# Altium footprint library Switches.PcbLib: 69 footprints (part 1 of 5)
Each footprint in its own frame and in the unit in brackets; x right, y up, seen from the top. Pads: shape width x height; smd on the part's side, far side on the other; paste and mask are expansions set on the pad; w line width, h text height; cw(c..) or ccw(c..) is an arc to the next point about the centre after c.
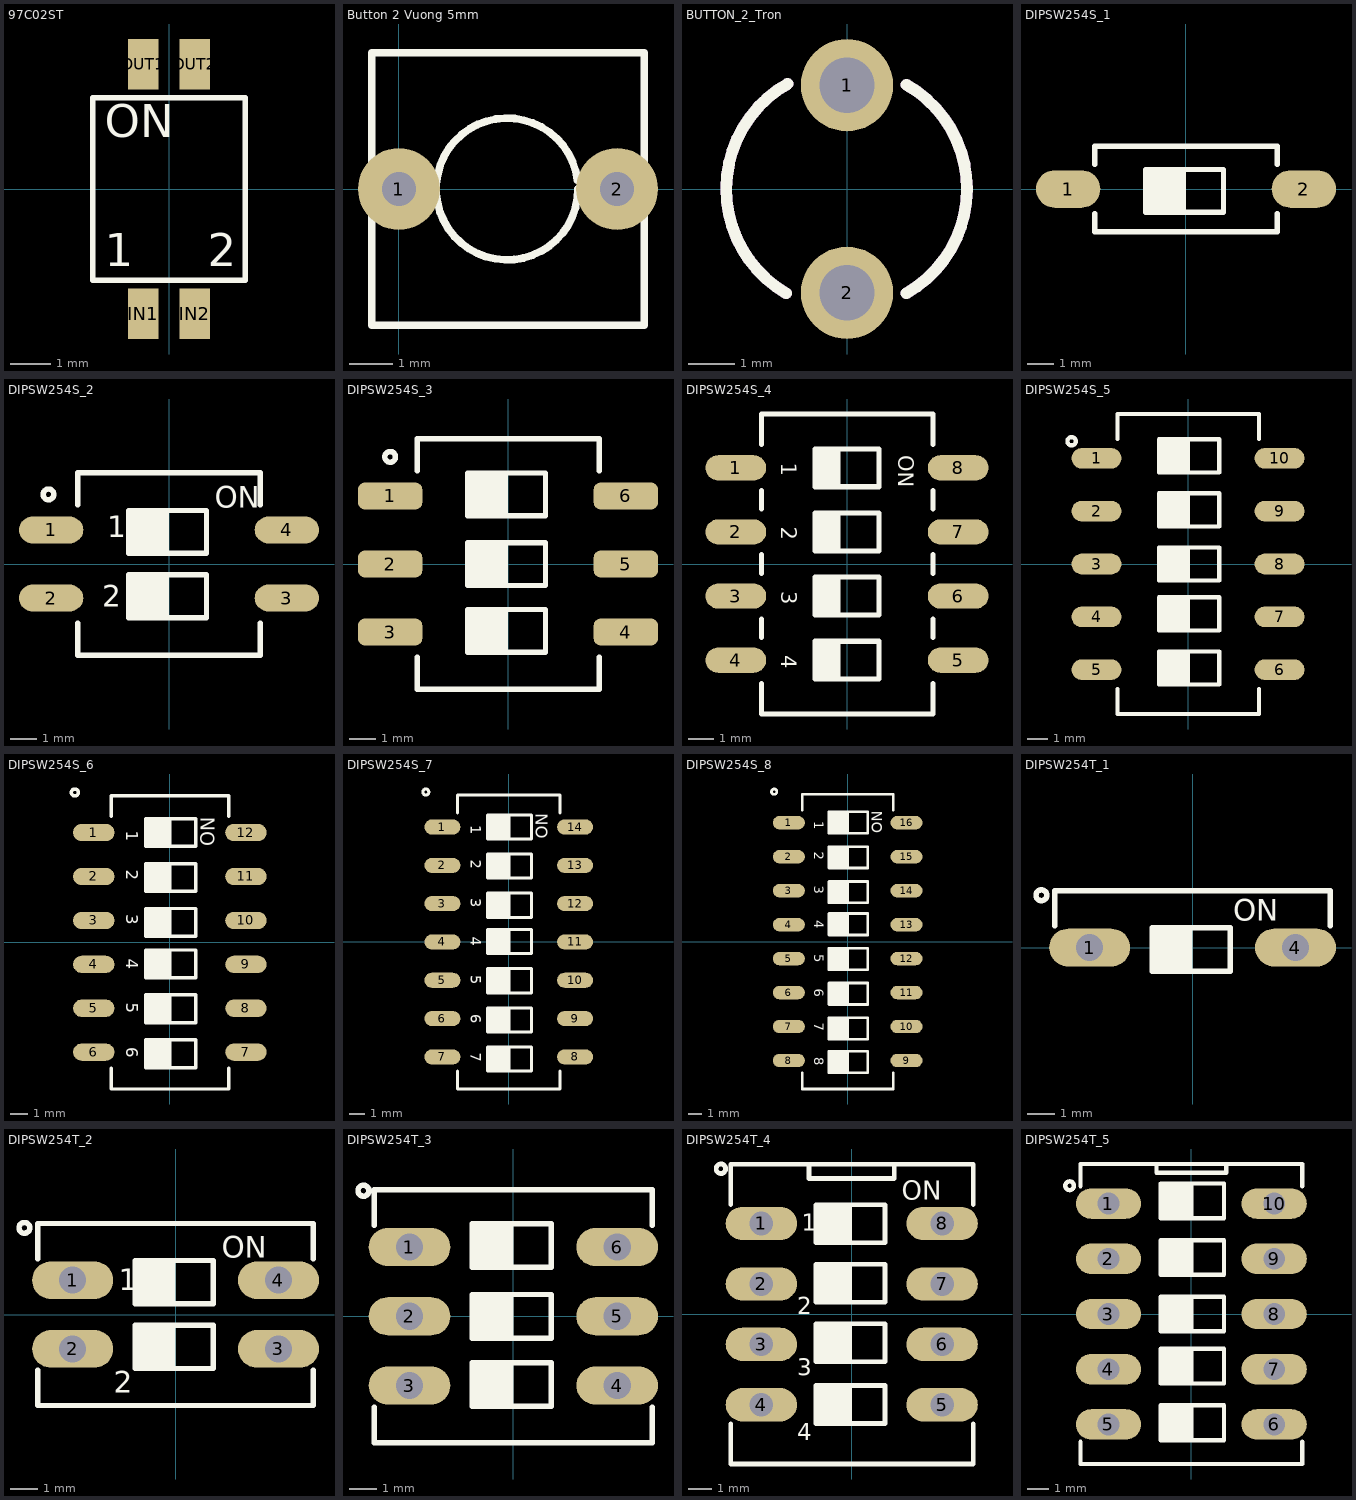
[diagram p0: the footprints below, top view; thin cyan lines are the x and y axes]

## 97C02ST [mm]
pads (4):
  rect 0.76x1.245 smd: IN1(-0.635,-3.075) IN2(0.635,-3.075) OUT1(-0.635,3.075) OUT2(0.635,3.075)
Top Overlay:
  lines w0.127: -1.88,-2.25 1.88,-2.25 1.88,2.25 -1.88,2.25 -1.88,-2.25
  text "2" at 0.953,-1.905 h0.81
  text "1" at -1.587,-1.905 h0.81
  text "ON" at -1.587,1.27 h0.81

## Button 2 Vuong 5mm [mil] "SW button 2pin, 250x 250 mil"
height 100
pads (2):
  round 75 hole 31: 1(0,0) 2(200,0)
Top Overlay:
  lines w7: 163.64,8.26 ccw(c99.17,0) 164.17,0 ; -25,-125 -25,125 225,125 225,-125 -25,-125
Top Designator:
  text ".Designator" at -46.08,-13.54 h60
3D body "boton.step": height 188.98, standoff -137.8, extent -23.62,-122.04 220.48,122.05

## BUTTON_2_Tron [mm]
pads (2):
  round 2 hole 1.2 mask+0: 1(0,2.25) 2(0,-2.25)
Top Overlay:
  lines w0.254: -1.315,-2.262 cw(c0,0) -1.287,2.278 ; 1.285,-2.261 ccw(c0,0) 1.29,2.258
Top Designator:
  text ".Designator" at -3.718,-0.344 h1.52
Mechanical 15:
  lines w0.254: -1.315,-2.262 cw(c0,0) -1.287,2.278 ; 1.285,-2.261 ccw(c0,0) 1.29,2.258
3D body: height 1.5, standoff 0, extent -2.485,-2.54 2.515,2.46
3D body: height 2.5, standoff 1.5, extent -1.475,-1.54 1.525,1.46

## DIPSW254S_1 [mm] "SWITCH DIP 1POS, THD, 2.54mm"
height 6.5
pads (2):
  oval 2.4x1.4 smd: 1(-4.4,0) 2(4.4,0)
Top Overlay:
  rectangle: -1.5,-0.87 0,0.73
  lines w0.2: -3.4,-0.93 -3.4,-1.6 3.4,-1.6 3.4,-0.93 ; -3.4,0.93 -3.4,1.6 3.4,1.6 3.4,0.93 ; -1.5,-0.87 -1.5,0.73 1.4,0.73 1.4,-0.87 -1.5,-0.87
Top Designator:
  text ".Designator" at -3.71,-0.344 h1.52
3D body "418121160801.stp": height 3.35, standoff 0.05, extent -4.95,-1.49 4.95,1.49

## DIPSW254S_2 [mm] "SWITCH DIP 2POS, THD, 2.54mm, SD02"
height 6.5
pads (4):
  oval 2.4x1 smd: 1(-4.4,1.27) 2(-4.4,-1.27) 3(4.4,-1.27) 4(4.4,1.27)
Top Overlay:
  circle w0.2: c-4.5,2.6 r0.2
  rectangle: -1.5,0.4 0,2
  rectangle: -1.5,-2 0,-0.4
  lines w0.2: -3.4,-2.2 -3.4,-3.4 3.4,-3.4 3.4,-2.2 ; -3.4,2.2 -3.4,3.4 3.4,3.4 3.4,2.2 ; -1.5,-2 1.4,-2 1.4,-0.4 -1.5,-0.4 -1.5,-2 ; -1.5,0.4 1.4,0.4 1.4,2 -1.5,2 -1.5,0.4
  text "2" at -2.5,-1.6 h0.8
  text "1" at -2.3,1 h0.8
  text "ON" at 1.7,2.1 h0.8
Top Designator:
  text ".Designator" at -3.71,-0.344 h1.52
3D body "User Library-DIP SW 2P.step": height 4.15, standoff 0, extent -4.95,-3.275 4.95,3.275

## DIPSW254S_3 [mm] "SWITCH DIP 3POS, THD, 2.54mm, SD03"
pads (6):
  rrect50% 2.4x1 smd: 1(-4.4,2.54) 2(-4.4,0) 3(-4.4,-2.54) 4(4.4,-2.54) 5(4.4,0) 6(4.4,2.54)
Top Overlay:
  circle w0.2: c-4.4,4 r0.2
  rectangle: -1.5,1.8 0,3.4
  rectangle: -1.5,-0.8 0,0.8
  rectangle: -1.5,-3.3 0,-1.7
  lines w0.2: -3.39,-3.47 -3.39,-4.67 3.41,-4.67 3.41,-3.47 ; -3.39,3.47 -3.39,4.67 3.41,4.67 3.41,3.47 ; -1.5,-3.3 1.4,-3.3 1.4,-1.7 -1.5,-1.7 -1.5,-3.3 ; -1.5,-0.8 1.4,-0.8 1.4,0.8 -1.5,0.8 -1.5,-0.8 ; -1.5,1.8 1.4,1.8 1.4,3.4 -1.5,3.4 -1.5,1.8
Top Designator:
  text ".Designator" at -3.71,-0.344 h1.52
3D body "User Library-DIP SW 3P.step": height 4.15, standoff 0, extent -4.95,-4.545 4.95,4.545

## DIPSW254S_4 [mm] "SWITCH DIP 4POS, SMD, 2.54mm, CTS-219-04"
pads (8):
  oval 2.4x1 smd: 1(-4.4,3.81) 2(-4.4,1.27) 3(-4.4,-1.27) 4(-4.4,-3.81) 5(4.4,-3.81) 6(4.4,-1.27) 7(4.4,1.27) 8(4.4,3.81)
Top Overlay:
  region: -1.27,4.56 -1.27,3.06 -0.254,3.06 -0.254,4.56
  region: -1.27,2.02 -1.27,0.52 -0.254,0.52 -0.254,2.02
  region: -1.27,-0.52 -1.27,-2.02 -0.254,-2.02 -0.254,-0.52
  region: -1.27,-3.06 -1.27,-4.56 -0.254,-4.56 -0.254,-3.06
  lines w0.2: -3.39,-4.74 -3.39,-5.94 3.41,-5.94 3.41,-4.74 ; -3.39,-2.91 -3.39,-2.17 ; -3.39,-0.37 -3.39,0.37 ; -3.39,2.17 -3.39,2.91 ; -3.39,4.74 -3.39,5.94 3.41,5.94 3.41,4.74 ; 3.41,-2.91 3.41,-2.17 ; 3.41,-0.37 3.41,0.37 ; 3.41,2.17 3.41,2.91 ; -1.27,-4.56 -1.27,-3.06 1.27,-3.06 1.27,-4.56 -1.27,-4.56 ; -1.27,-2.02 -1.27,-0.52 1.27,-0.52 1.27,-2.02 -1.27,-2.02 ; -1.27,0.52 -1.27,2.02 1.27,2.02 1.27,0.52 -1.27,0.52 ; -1.27,3.06 -1.27,4.56 1.27,4.56 1.27,3.06 -1.27,3.06
  text "ON" at 2.021,4.31 h0.61
  text "1" at -2.596,4.01 h0.61
  text "2" at -2.596,1.47 h0.61
  text "3" at -2.596,-1.07 h0.61
  text "4" at -2.596,-3.61 h0.61
Top Designator:
  text ".Designator" at -3.71,-0.344 h1.52
3D body "User Library-DIP SW 4P.step": height 4.15, standoff 0, extent -4.95,-5.815 4.95,5.815

## DIPSW254S_5 [mm] "SWITCH DIP 5POS, THD, 2.54mm,"
pads (10):
  oval 2.4x1 smd: 1(-4.4,5.08) 2(-4.4,2.54) 3(-4.4,0) 4(-4.4,-2.54) 5(-4.4,-5.08) 6(4.4,-5.08) 7(4.4,-2.54) 8(4.4,0) 9(4.4,2.54) 10(4.4,5.08)
Top Overlay:
  circle w0.2: c-5.6,5.9 r0.2
  rectangle: -1.4,4.4 0.1,6
  rectangle: -1.4,1.8 0.1,3.4
  rectangle: -1.4,-0.8 0.1,0.8
  rectangle: -1.4,-3.2 0.1,-1.6
  rectangle: -1.4,-5.8 0.1,-4.2
  lines w0.2: -3.39,-6.01 -3.39,-7.21 3.41,-7.21 3.41,-6.01 ; -3.39,6.01 -3.39,7.21 3.41,7.21 3.41,6.01 ; -1.4,-5.8 -1.4,-4.2 1.5,-4.2 1.5,-5.8 -1.4,-5.8 ; -1.4,-3.2 -1.4,-1.6 1.5,-1.6 1.5,-3.2 -1.4,-3.2 ; -1.4,-0.8 -1.4,0.8 1.5,0.8 1.5,-0.8 -1.4,-0.8 ; -1.4,1.8 -1.4,3.4 1.5,3.4 1.5,1.8 -1.4,1.8 ; -1.4,4.4 -1.4,6 1.5,6 1.5,4.4 -1.4,4.4
Top Designator:
  text ".Designator" at -3.81,-0.344 h1.52
3D body "User Library-DIP SW 5P.step": height 4.15, standoff 0, extent -4.95,-7.085 4.95,7.085

## DIPSW254S_6 [mm] "SWITCH DIP 6POS, THD, 2.54mm,"
height 6.5
pads (12):
  oval 2.4x1 smd: 1(-4.4,6.35) 2(-4.4,3.81) 3(-4.4,1.27) 4(-4.4,-1.27) 5(-4.4,-3.81) 6(-4.4,-6.35) 7(4.4,-6.35) 8(4.4,-3.81) 9(4.4,-1.27) 10(4.4,1.27) 11(4.4,3.81) 12(4.4,6.35)
Top Overlay:
  circle w0.2: c-5.5,8.67 r0.2
  rectangle: -1.4,-7.24 0.1,-5.64
  rectangle: -1.4,-4.64 0.1,-3.04
  rectangle: -1.4,-2.04 0.1,-0.44
  rectangle: -1.4,0.36 0.1,1.96
  rectangle: -1.4,2.96 0.1,4.56
  rectangle: -1.4,5.56 0.1,7.16
  lines w0.2: -3.39,-7.28 -3.39,-8.48 3.41,-8.48 3.41,-7.28 ; -3.39,7.28 -3.39,8.48 3.41,8.48 3.41,7.28 ; -1.4,-7.24 1.5,-7.24 1.5,-5.64 -1.4,-5.64 -1.4,-7.24 ; -1.4,-4.64 1.5,-4.64 1.5,-3.04 -1.4,-3.04 -1.4,-4.64 ; -1.4,-2.04 1.5,-2.04 1.5,-0.44 -1.4,-0.44 -1.4,-2.04 ; -1.4,0.36 1.5,0.36 1.5,1.96 -1.4,1.96 -1.4,0.36 ; -1.4,2.96 1.5,2.96 1.5,4.56 -1.4,4.56 -1.4,2.96 ; -1.4,5.56 1.5,5.56 1.5,7.16 -1.4,7.16 -1.4,5.56
  text "6" at -2.51,-6.055 h0.7
  text "5" at -2.51,-3.494 h0.7
  text "4" at -2.51,-0.934 h0.7
  text "3" at -2.51,1.627 h0.7
  text "2" at -2.51,4.187 h0.7
  text "1" at -2.51,6.451 h0.7
  text "ON" at 2.6,5.56 h0.8
Top Designator:
  text ".Designator" at -3.76,-0.149 h1.52
3D body "User Library-DIP SW 6P.step": height 4.15, standoff 0, extent -4.95,-8.355 4.95,8.355

## DIPSW254S_7 [mm] "SWITCH DIP 7POS, THD, 2.54mm,"
height 6.5
pads (14):
  oval 2.4x1 smd: 1(-4.4,7.62) 2(-4.4,5.08) 3(-4.4,2.54) 4(-4.4,0) 5(-4.4,-2.54) 6(-4.4,-5.08) 7(-4.4,-7.62) 8(4.4,-7.62) 9(4.4,-5.08) 10(4.4,-2.54) 11(4.4,0) 12(4.4,2.54) 13(4.4,5.08) 14(4.4,7.62)
Top Overlay:
  circle w0.2: c-5.5,9.94 r0.2
  rectangle: -1.4,6.83 0.1,8.43
  rectangle: -1.4,4.23 0.1,5.83
  rectangle: -1.4,1.63 0.1,3.23
  rectangle: -1.4,-0.77 0.1,0.83
  rectangle: -1.4,-3.37 0.1,-1.77
  rectangle: -1.4,-5.97 0.1,-4.37
  rectangle: -1.4,-8.57 0.1,-6.97
  lines w0.2: -3.39,-8.55 -3.39,-9.75 3.41,-9.75 3.41,-8.55 ; -3.39,8.55 -3.39,9.75 3.41,9.75 3.41,8.55 ; -1.4,-8.57 -1.4,-6.97 1.5,-6.97 1.5,-8.57 -1.4,-8.57 ; -1.4,-5.97 -1.4,-4.37 1.5,-4.37 1.5,-5.97 -1.4,-5.97 ; -1.4,-3.37 -1.4,-1.77 1.5,-1.77 1.5,-3.37 -1.4,-3.37 ; -1.4,-0.77 -1.4,0.83 1.5,0.83 1.5,-0.77 -1.4,-0.77 ; -1.4,1.63 -1.4,3.23 1.5,3.23 1.5,1.63 -1.4,1.63 ; -1.4,4.23 -1.4,5.83 1.5,5.83 1.5,4.23 -1.4,4.23 ; -1.4,6.83 -1.4,8.43 1.5,8.43 1.5,6.83 -1.4,6.83
  text "ON" at 2.6,6.83 h0.8
  text "1" at -2.51,7.721 h0.7
  text "2" at -2.51,5.457 h0.7
  text "3" at -2.51,2.897 h0.7
  text "4" at -2.51,0.336 h0.7
  text "5" at -2.51,-2.224 h0.7
  text "6" at -2.51,-4.785 h0.7
  text "7" at -2.51,-7.345 h0.7
Top Designator:
  text ".Designator" at -3.76,-0.149 h1.52
3D body "User Library-DIP SW 7P.step": height 4.15, standoff 0, extent -4.95,-9.625 4.95,9.625

## DIPSW254S_8 [mm] "SWITCH DIP 8POS, THD, 2.54mm,"
height 6.5
pads (16):
  oval 2.4x1 smd: 1(-4.4,8.89) 2(-4.4,6.35) 3(-4.4,3.81) 4(-4.4,1.27) 5(-4.4,-1.27) 6(-4.4,-3.81) 7(-4.4,-6.35) 8(-4.4,-8.89) 9(4.4,-8.89) 10(4.4,-6.35) 11(4.4,-3.81) 12(4.4,-1.27) 13(4.4,1.27) 14(4.4,3.81) 15(4.4,6.35) 16(4.4,8.89)
Top Overlay:
  circle w0.2: c-5.5,11.21 r0.2
  rectangle: -1.4,8.1 0.1,9.7
  rectangle: -1.4,5.5 0.1,7.1
  rectangle: -1.4,2.9 0.1,4.5
  rectangle: -1.4,0.5 0.1,2.1
  rectangle: -1.4,-2.1 0.1,-0.5
  rectangle: -1.4,-4.7 0.1,-3.1
  rectangle: -1.4,-7.3 0.1,-5.7
  rectangle: -1.4,-9.8 0.1,-8.2
  lines w0.2: -3.39,-9.82 -3.39,-11.02 3.41,-11.02 3.41,-9.82 ; -3.39,9.82 -3.39,11.02 3.41,11.02 3.41,9.82 ; -1.4,-9.8 -1.4,-8.2 1.5,-8.2 1.5,-9.8 -1.4,-9.8 ; -1.4,-7.3 -1.4,-5.7 1.5,-5.7 1.5,-7.3 -1.4,-7.3 ; -1.4,-4.7 -1.4,-3.1 1.5,-3.1 1.5,-4.7 -1.4,-4.7 ; -1.4,-2.1 -1.4,-0.5 1.5,-0.5 1.5,-2.1 -1.4,-2.1 ; -1.4,0.5 -1.4,2.1 1.5,2.1 1.5,0.5 -1.4,0.5 ; -1.4,2.9 -1.4,4.5 1.5,4.5 1.5,2.9 -1.4,2.9 ; -1.4,5.5 -1.4,7.1 1.5,7.1 1.5,5.5 -1.4,5.5 ; -1.4,8.1 -1.4,9.7 1.5,9.7 1.5,8.1 -1.4,8.1
  text "ON" at 2.6,8.1 h0.8
  text "1" at -2.51,8.991 h0.7
  text "2" at -2.51,6.727 h0.7
  text "3" at -2.51,4.167 h0.7
  text "4" at -2.51,1.606 h0.7
  text "5" at -2.51,-0.954 h0.7
  text "6" at -2.51,-3.515 h0.7
  text "7" at -2.51,-6.075 h0.7
  text "8" at -2.51,-8.636 h0.7
Top Designator:
  text ".Designator" at -3.76,-0.149 h1.52
3D body "User Library-DIP SW 8P.step": height 4.15, standoff 0, extent -4.95,-10.895 4.95,10.895

## DIPSW254T_1 [mm] "SWITCH DIP 1POS, THD, 2.54mm"
height 6.5
pads (2):
  oval 3x1.4 / inner round 1.4 / far side oval 2.2x1.4 hole 1: 1(-3.81,0) 4(3.81,0)
Top Overlay:
  circle w0.2: c-5.6,1.94 r0.2
  rectangle: -1.5,-0.87 0,0.73
  lines w0.2: -5.1,0.8 -5.1,2.1 5.1,2.1 5.1,0.8 ; -1.5,-0.87 -1.5,0.73 1.4,0.73 1.4,-0.87 -1.5,-0.87
  text "ON" at 1.5,1 h0.8
Top Designator:
  text ".Designator" at -3.955,-0.224 h1.52
3D body "User Library-DIP_1.step": height 6.86, standoff -3.62, extent -5,-2 5,2

## DIPSW254T_2 [mm] "SWITCH DIP 2POS, THD, 2.54mm, SD02"
height 6.5
pads (4):
  oval 3x1.4 / inner round 1.4 / far side oval 2.2x1.4 hole 1: 1(-3.81,1.27) 2(-3.81,-1.27) 3(3.81,-1.27) 4(3.81,1.27)
Top Overlay:
  circle w0.2: c-5.6,3.21 r0.2
  rectangle: -1.5,-2 0,-0.4
  rectangle: -1.5,0.4 0,2
  lines w0.2: -5.1,-2.07 -5.1,-3.37 5.1,-3.37 5.1,-2.07 ; -5.1,2.07 -5.1,3.37 5.1,3.37 5.1,2.07 ; -1.5,-2 -1.5,-0.4 1.4,-0.4 1.4,-2 -1.5,-2 ; -1.5,0.4 -1.5,2 1.4,2 1.4,0.4 -1.5,0.4
  text "ON" at 1.7,2.1 h0.8
  text "1" at -2.1,0.9 h0.8
  text "2" at -2.3,-2.9 h0.8
Top Designator:
  text ".Designator" at -3.955,-0.324 h1.52
3D body "SSGM120100.STEP": height 5, standoff -3, extent -4.704,-3.45 4.704,3.45

## DIPSW254T_3 [mm] "SWITCH DIP 3POS, THD, 2.54mm, SD03"
pads (6):
  oval 3x1.4 / inner round 1.4 / far side oval 2.2x1.4 hole 1: 1(-3.81,2.54) 2(-3.81,0) 3(-3.81,-2.54) 4(3.81,-2.54) 5(3.81,0) 6(3.81,2.54)
Top Overlay:
  circle w0.2: c-5.5,4.61 r0.2
  rectangle: -1.5,1.8 0,3.4
  rectangle: -1.5,-0.8 0,0.8
  rectangle: -1.5,-3.3 0,-1.7
  lines w0.2: -5.1,-3.34 -5.1,-4.64 5.1,-4.64 5.1,-3.34 ; -5.1,3.34 -5.1,4.64 5.1,4.64 5.1,3.34 ; -1.5,-3.3 1.4,-3.3 1.4,-1.7 -1.5,-1.7 -1.5,-3.3 ; -1.5,-0.8 1.4,-0.8 1.4,0.8 -1.5,0.8 -1.5,-0.8 ; -1.5,1.8 1.4,1.8 1.4,3.4 -1.5,3.4 -1.5,1.8
Top Designator:
  text ".Designator" at -3.905,-0.259 h1.52
3D body "SSGM130100.STEP": height 5.3, standoff -2.7, extent -4.704,-4.7 4.704,4.7

## DIPSW254T_4 [mm] "SWITCH DIP 4POS, THD, 2.54mm, YL04"
height 6.5
pads (8):
  oval 3x1.4 / inner round 1.4 / far side oval 2.2x1.4 hole 1 mask+0.1: 1(-3.8,3.81) 2(-3.8,1.27) 3(-3.8,-1.27) 4(-3.8,-3.81) 5(3.8,-3.81) 6(3.8,-1.27) 7(3.8,1.27) 8(3.8,3.81)
Top Overlay:
  circle w0.2: c-5.5,6.11 r0.2
  rectangle: -1.5,3 0,4.6
  rectangle: -1.5,0.5 0,2.1
  rectangle: -1.5,-2 0,-0.4
  rectangle: -1.5,-4.6 0,-3
  lines w0.2: -5.09,-4.61 -5.09,-6.3 5.11,-6.3 5.11,-4.61 ; -5.09,4.61 -5.09,6.3 5.11,6.3 5.11,4.61 ; -1.8,6.3 -1.8,5.7 1.79,5.7 1.79,6.3 ; -1.5,-4.6 -1.5,-3 1.4,-3 1.4,-4.6 -1.5,-4.6 ; -1.5,-2 -1.5,-0.4 1.4,-0.4 1.4,-2 -1.5,-2 ; -1.5,0.5 -1.5,2.1 1.4,2.1 1.4,0.5 -1.5,0.5 ; -1.5,3 1.4,3 1.4,4.6 -1.5,4.6 -1.5,3
  text "ON" at 2.1,4.8 h0.8
  text "1" at -2.1,3.5 h0.7
  text "2" at -2.3,0 h0.7
  text "3" at -2.3,-2.6 h0.7
  text "4" at -2.3,-5.3 h0.7
Top Designator:
  text ".Designator" at -3.91,-0.339 h1.52
3D body "User Library-DIP SWITCH 4 POS CTS 206.step": height 8.14, standoff -3.5, extent -4.89,-6.17 4.89,6.17

## DIPSW254T_5 [mm] "SWITCH DIP 5POS, THD, 2.54mm,"
pads (10):
  oval 3x1.4 / inner round 1.4 / far side oval 2.2x1.4 hole 1: 1(-3.81,5.08) 2(-3.81,2.54) 3(-3.81,0) 4(-3.81,-2.54) 5(-3.81,-5.08) 6(3.81,-5.08) 7(3.81,-2.54) 8(3.81,0) 9(3.81,2.54) 10(3.81,5.08)
Top Overlay:
  circle w0.2: c-5.6,5.9 r0.2
  rectangle: -1.4,-5.8 0.1,-4.2
  rectangle: -1.4,-3.2 0.1,-1.6
  rectangle: -1.4,-0.8 0.1,0.8
  rectangle: -1.4,1.8 0.1,3.4
  rectangle: -1.4,4.4 0.1,6
  lines w0.2: -5.1,-5.88 -5.1,-6.9 5.1,-6.9 5.1,-5.88 ; -5.1,5.88 -5.1,6.9 5.1,6.9 5.1,5.88 ; -1.6,6.9 -1.6,6.5 1.6,6.5 1.6,6.9 ; -1.4,-5.8 1.5,-5.8 1.5,-4.2 -1.4,-4.2 -1.4,-5.8 ; -1.4,-3.2 1.5,-3.2 1.5,-1.6 -1.4,-1.6 -1.4,-3.2 ; -1.4,-0.8 1.5,-0.8 1.5,0.8 -1.4,0.8 -1.4,-0.8 ; -1.4,1.8 1.5,1.8 1.5,3.4 -1.4,3.4 -1.4,1.8 ; -1.4,4.4 1.5,4.4 1.5,6 -1.4,6 -1.4,4.4
Top Designator:
  text ".Designator" at -3.955,-0.344 h1.52
3D body "User Library-DIP-10.step": height 7, standoff -3.7, extent -4.95,-6.8 4.95,6.9